# Altium footprint library LCM.PcbLib: 29 footprints (part 1 of 2)
Each footprint in its own frame and in the unit in brackets; x right, y up, seen from the top. Pads: shape width x height; smd on the part's side, far side on the other; paste and mask are expansions set on the pad; w line width, h text height; cw(c..) or ccw(c..) is an arc to the next point about the centre after c.
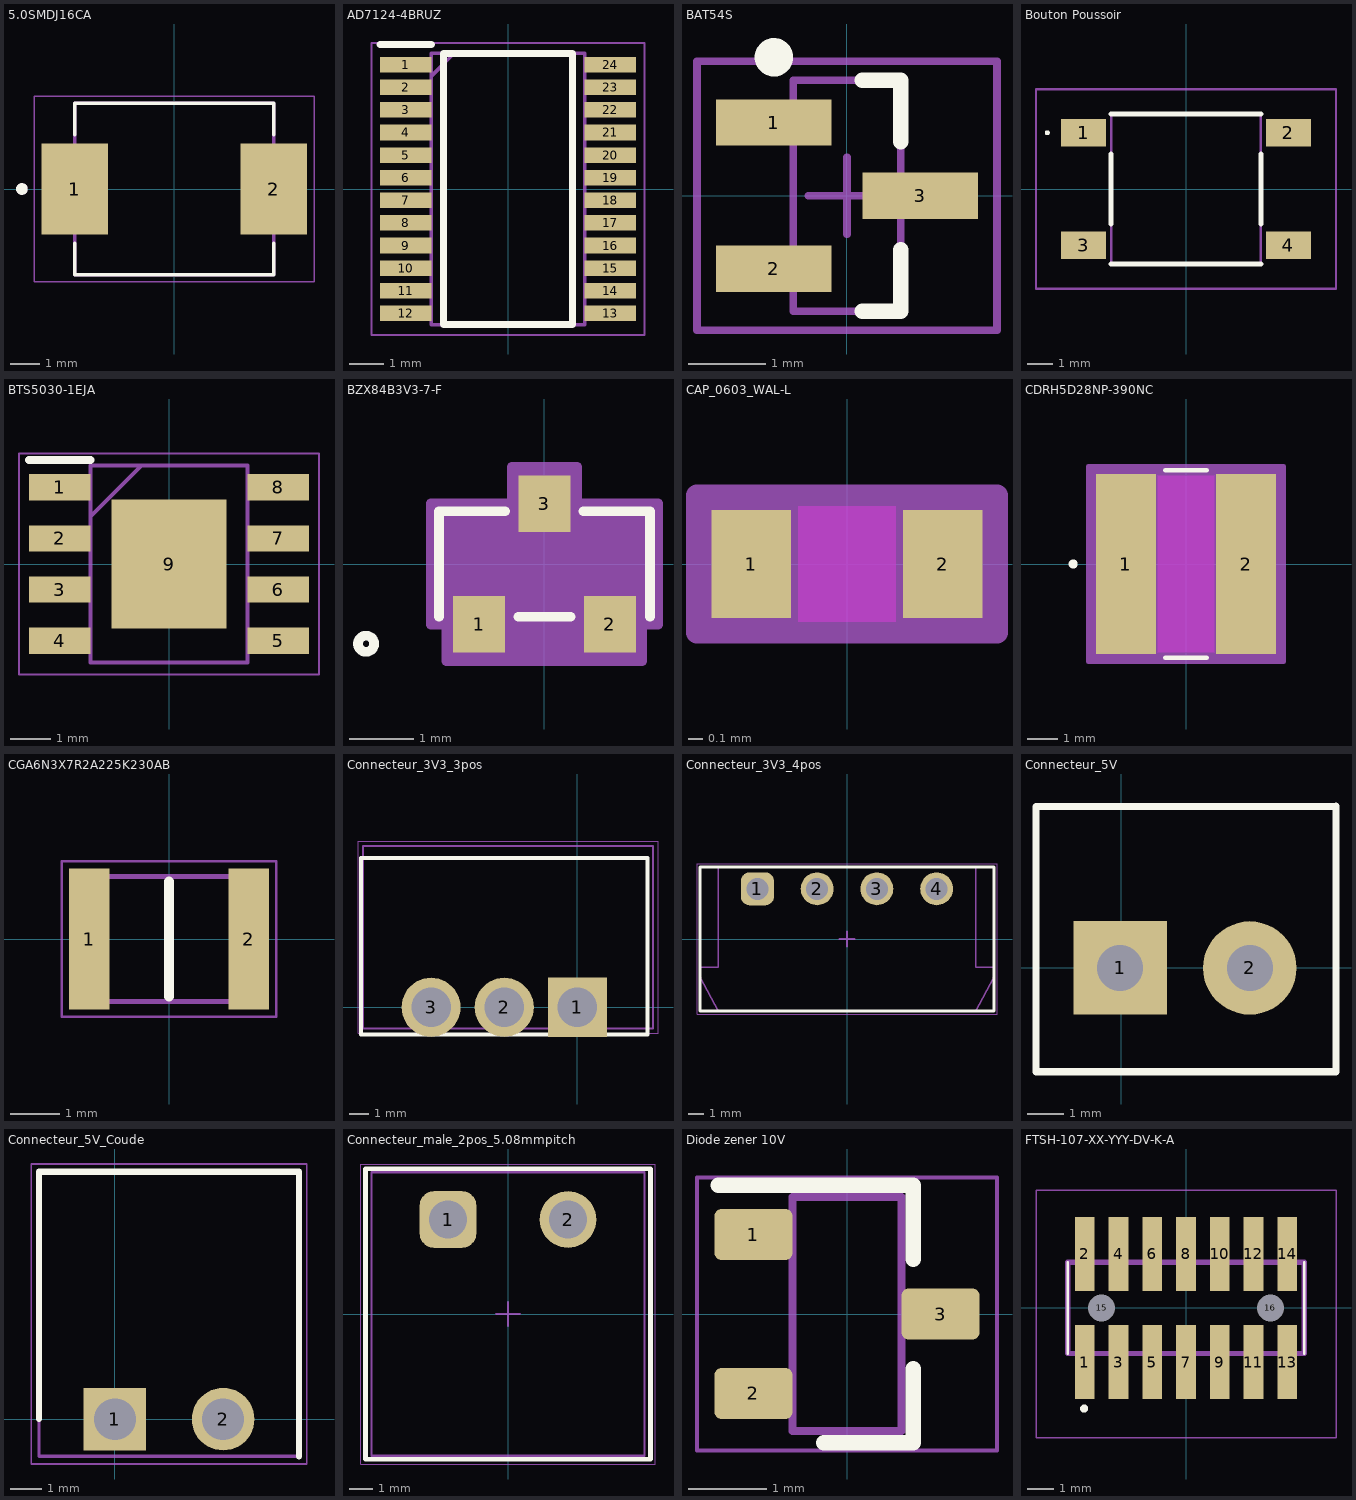
[diagram p0: the footprints below, top view; thin cyan lines are the x and y axes]

## 5.0SMDJ16CA [mm]
pads (2):
  rect 2.29x3.12 smd paste+0 mask+0.102: 1(-3.43,0) 2(3.43,0)
Top Overlay:
  circle w0.2: c-5.25,0 r0.1
  lines w0.127: -3.427,-1.88 -3.427,-2.953 3.427,-2.953 3.427,-1.88 ; -3.427,1.88 -3.427,2.953 3.427,2.953 3.427,1.88
Top 3D Body:
  circle w0.2: c-5.25,0 r0.1
  lines w0.05: -4.825,-3.203 -4.825,3.203 4.825,3.203 4.825,-3.203 -4.825,-3.203
  lines w0.127: -3.427,-2.953 -3.427,2.953 3.427,2.953 3.427,-2.953 -3.427,-2.953
3D body "step_temp.STEP": height 2.62, standoff 0, extent -3.97,-2.953 3.97,2.953

## AD7124-4BRUZ [mm]
pads (24):
  rect 1.475x0.45 smd: 1(-2.938,3.575) 2(-2.938,2.925) 3(-2.938,2.275) 4(-2.938,1.625) 5(-2.938,0.975) 6(-2.938,0.325) 7(-2.938,-0.325) 8(-2.938,-0.975) 9(-2.938,-1.625) 10(-2.938,-2.275) 11(-2.938,-2.925) 12(-2.938,-3.575) 13(2.938,-3.575) 14(2.938,-2.925) 15(2.938,-2.275) 16(2.938,-1.625) 17(2.938,-0.975) 18(2.938,-0.325) 19(2.938,0.325) 20(2.938,0.975) 21(2.938,1.625) 22(2.938,2.275) 23(2.938,2.925) 24(2.938,3.575)
Top Overlay:
  lines w0.2: -3.675,4.15 -2.2,4.15 ; -1.85,-3.9 -1.85,3.9 1.85,3.9 1.85,-3.9 -1.85,-3.9
Mechanical 15:
  lines w0.1: -2.2,3.25 -1.55,3.9 ; -2.2,-3.9 -2.2,3.9 2.2,3.9 2.2,-3.9 -2.2,-3.9
Mechanical 20:
  lines w0.05: -3.925,-4.2 -3.925,4.2 3.925,4.2 3.925,-4.2 -3.925,-4.2
3D body "AD7124-4BRUZ.stp": height 1.2, standoff 0, extent -3.2,-3.9 3.2,3.9

## BAT54S [mm] "SOT23, 3-Leads, Body 2.9x1.3mm, Pitch 0.95mm, Lead Span 2.5mm, IPC Medium Density"
height 1.1
pads (3):
  rect 1.5x0.6 smd: 1(-0.95,0.95) 2(-0.95,-0.95) 3(0.95,0)
Top Overlay:
  circle w0.25: c-0.95,1.8 r0.125
  lines w0.2: 0.2,-1.5 0.7,-1.5 0.7,-0.7 ; 0.2,1.5 0.7,1.5 0.7,0.7
Top 3D Body:
  lines w0.1: -0.7,-1.5 0.7,-1.5 0.7,1.5 -0.7,1.5 -0.7,-1.5
Mechanical 15:
  lines w0.1: -0.5,0 0.5,0 ; 0,-0.5 0,0.5 ; -1.95,-1.75 1.95,-1.75 1.95,1.75 -1.95,1.75 -1.95,-1.75
3D body: height 1.1, standoff 0, extent -0.7,-1.5 0.7,1.5
3D body "SW3dPS-3-lead sot23-3.STEP": height 1.01, standoff -0.01, extent -1.245,-1.435 1.231,1.485

## Bouton Poussoir [mm] "TS406633BK260SMTTR"
pads (4):
  rect 1.8x1.1 smd: 1(-4.1,2.25) 2(4.1,2.25) 3(-4.1,-2.25) 4(4.1,-2.25)
Top Overlay:
  lines w0.1: -5.6,2.25 ccw(c-5.55,2.25) -5.5,2.25 ccw(c-5.55,2.25) -5.6,2.25
  lines w0.2: -3,-3 3,-3 ; -3,-1.4 -3,1.4 ; -3,3 3,3 ; 3,-1.4 3,1.4
Top 3D Body:
  lines w0.1: -3,-3 3,-3 3,3 -3,3 -3,-3
Mechanical 15:
  lines w0.1: -6,-4 6,-4 6,4 -6,4 -6,-4
3D body "TS40-66-33-BK-260-SMT-TR.stp": height 3.3, standoff 0, extent -4.5,-3 4.5,3

## BTS5030-1EJA [mm]
pads (9):
  rect 1.525x0.65 smd: 1(-2.712,1.905) 2(-2.712,0.635) 3(-2.712,-0.635) 4(-2.712,-1.905) 5(2.712,-1.905) 6(2.712,-0.635) 7(2.712,0.635) 8(2.712,1.905)
  rect 2.85x3.2 smd: 9(0,0)
Top Overlay:
  lines w0.2: -3.475,2.58 -1.95,2.58
Mechanical 15:
  lines w0.1: -1.95,1.18 -0.68,2.45 ; -1.95,-2.45 1.95,-2.45 1.95,2.45 -1.95,2.45 -1.95,-2.45
Mechanical 20:
  lines w0.05: -3.725,-2.75 3.725,-2.75 3.725,2.75 -3.725,2.75 -3.725,-2.75
3D body "BTS5030-1EJA.stp": height 1.7, standoff 0, extent -3,-2.45 3,2.45

## BZX84B3V3-7-F [mil]
pads (3):
  rect 32x35 smd paste+0 mask+0: 1(-40.35,-37.2) 2(40.35,-37.2) 3(0,37.2)
Top Overlay:
  circle w6: c-110.04,-49.21 r5
  lines w6: -65.04,-32.56 -65.04,32.56 -24.14,32.56 ; -16.21,-32.56 16.21,-32.56 ; 24.14,32.56 65.04,32.56 65.04,-32.56
Top 3D Body:
  circle w0: c-50.04,-17.56 r5
  lines w1: -60.04,-27.56 60.04,-27.56 60.04,27.56 -60.04,27.56 -60.04,-27.56 ; -50.39,-49.21 -50.39,-27.56 -30.32,-27.56 -30.32,-49.21 -50.39,-49.21 ; -10.04,27.56 10.04,27.56 10.04,49.21 -10.04,49.21 -10.04,27.56 ; 30.32,-49.21 30.32,-27.56 50.39,-27.56 50.39,-49.21 30.32,-49.21
Mechanical 15:
  region: -70.04,-37.56 -70.04,37.56 -20.04,37.56 -20.04,60 20,60 20.04,37.56 70.04,37.56 70.04,-37.56 60.39,-37.56 60.39,-60 -60.39,-60 -60.39,-37.56
  region: 60.04,-27.56 -60.04,-27.56 -60.04,27.56 60.04,27.56
  lines w6: -60.39,-60 -60.39,-37.56 -70.04,-37.56 -70.04,37.56 -20.04,37.56 -20,60 ; -60,-60 60,-60 ; -20.04,60 20.04,60 20.04,37.56 70.04,37.56 70.04,-37.56 60.39,-37.56 60.39,-60
3D body "BZX84B3V3-7-F.stp": height 39.37, standoff -3.94, extent -59.06,-49.63 59.06,54.75

## CAP_0603_WAL-L [mil]
pads (2):
  rect 22x30 smd paste+0 mask+0: 1(-26.5,0) 2(26.5,0)
Top Layer keep-out:
  region: -13.5,-14 -13.5,14 13.5,14 13.5,-14
Keep-Out Layer:
  region: -13.5,-16 -13.5,16 13.5,16 13.5,-16
Top 3D Body:
  circle w1: c-21.5,0 r3
  lines w1: -31.5,-16 -31.5,16 ; -31.5,-16 31.5,-16 ; -31.5,-16 -15.5,-16 -15.5,16 -31.5,16 ; -31.5,-16 -31.5,16 ; -31.5,16 31.5,16 ; 31.5,-16 31.5,16 ; 31.5,-16 31.5,16 ; 31.5,-16 15.5,-16 15.5,16 31.5,16
Mechanical 15:
  region: 41.5,-19 -41.5,-19 -41.5,19 41.5,19
  lines w6: -41.5,-19 41.5,-19 41.5,19 -41.5,19 -41.5,-19
3D body "CAP_0603_WAL.step": height 32.01, standoff 0, extent -31.5,-15.98 31.5,15.98

## CDRH5D28NP-390NC [mil] "Inductance, 39µH, 700mA"
pads (2):
  rect 78.63x236 smd paste+0 mask+0: 1(-78.69,0) 2(78.69,0)
Top Layer keep-out:
  region: -37.37,-116 -37.37,116 37.37,116 37.37,-116
Top Overlay:
  circle w6: c-148,0 r3
  lines w6: -27.26,-123 27.26,-123 ; -27.26,123 27.26,123
Top 3D Body:
  circle w1: c-115,0 r3
  lines w1: -118,-118 118,-118 118,118 -118,118 -118,-118
Mechanical 15:
  region: -128,-128 -128,128 128,128 128,-128
  lines w6: -128,-128 -128,128 128,128 128,-128 -128,-128
3D body "IND_NP-100NC_SUM.step": height 118.11, standoff -0.12, extent -117.99,-118.11 117.99,118.11

## CGA6N3X7R2A225K230AB [mm] "Condensateurs céramique multicouches MLCC - CMS CGA 1210 100V 2.2uF X7R 10% AEC-Q200"
pads (2):
  rect 0.81x2.82 smd: 1(-1.6,0) 2(1.6,0)
Top Overlay:
  lines w0.2: 0,-1.15 0,1.15
Mechanical 15:
  lines w0.1: -1.6,-1.25 -1.6,1.25 1.6,1.25 1.6,-1.25 -1.6,-1.25
Mechanical 20:
  lines w0.05: -2.155,-1.56 -2.155,1.56 2.155,1.56 2.155,-1.56 -2.155,-1.56
3D body "CGA6N3X7R2A225K230AB.stp": height 2.28, standoff 0.02, extent -1.4,-1.225 1.4,1.225

## Connecteur_3V3_3pos [mm]
pads (3):
  rect 3.075x3.075 / inner round 3.075 / far side rect 3.075x3.075 hole 2.05: 1(0,0)
  round 3.075 hole 2.05: 2(-3.81,0) 3(-7.62,0)
Top Overlay:
  lines w0.2: -11.27,-1.425 3.65,-1.425 3.65,7.775 -11.27,7.775 -11.27,-1.425
Top Assembly:
  lines w0.1: -11.27,-1.425 3.65,-1.425 3.65,7.775 -9.144,7.775 -11.27,7.775 -11.27,-1.425
Mechanical 15:
  lines w0.1: -11.18,-1.1 -11.18,8.4 3.95,8.4 3.95,-1.1 -11.18,-1.1
Mechanical 20:
  lines w0.05: -11.43,-1.35 -11.43,8.65 4.2,8.65 4.2,-1.35 -11.43,-1.35
3D body "691305340003.stp": height 7.28, standoff -3.42, extent -11.27,-1.425 3.65,7.775

## Connecteur_3V3_4pos [mm] "Horizontal PCB Header with Plastic Latch, pitch 3.81mm, 04p"
height 7
pads (4):
  rrect50% 2.1x2.1 hole 1.4: 1(-5.715,3.2)
  round 2.1 hole 1.4: 2(-1.905,3.2) 3(1.905,3.2) 4(5.715,3.2)
Top Overlay:
  lines w0.2: -9.37,-4.6 -3.621,-4.6 4.971,-4.6 9.37,-4.6 9.37,-1.958 9.37,4.6 -9.37,4.6 -9.37,-1.952 -9.37,-4.6
Top Courtyard:
  lines w0.05: -9.57,-4.8 -9.57,4.8 9.57,4.8 9.57,-4.8 -9.57,-4.8
Top Assembly:
  lines w0.1: -9.372,-2.451 -8.22,-4.6 8.22,-4.6 9.372,-2.451 ; -9.37,-2.45 -9.37,-1.8 -8.22,-1.8 -8.22,4.6 8.22,4.6 8.22,-1.8 9.37,-1.8 9.37,-2.45
Top 3D Body:
  lines w0.1: -9.37,-2.45 -9.37,-1.8 -8.22,-1.8 -8.22,4.6 8.22,4.6 8.22,-1.8 9.37,-1.8 9.37,-2.45 ; -8.22,-4.6 8.22,-4.6 9.372,-2.451
Top Component Center:
  lines w0.1: -0.5,0 0.5,0 ; 0,-0.5 0,0.5
3D body "691305340004.stp": height 7.25, standoff -3.45, extent -9.365,-4.6 9.365,4.6

## Connecteur_5V [mm]
pads (2):
  rect 2.54x2.54 hole 1.25: 1(-0.025,0)
  round 2.54 hole 1.25: 2(3.5,0)
Top Overlay:
  lines w0.2: -2.311,-2.819 -2.311,4.389 5.842,4.394 5.842,-2.819 -2.311,-2.819
3D body "WURTH_2V_3.5mm_691363110002.stp": height 21.81, standoff 2.51, extent -1.544,-5.08 5.456,5.32
3D body "WURTH_2V_male_3.5mm_691321100002.stp": height 9.2, standoff -3.5, extent -2.272,-2.787 5.828,4.413

## Connecteur_5V_Coude [mm]
pads (2):
  rect 2.025x2.025 hole 1.35: 1(0,0)
  round 2.025 hole 1.35: 2(3.5,0)
Top Overlay:
  lines w0.2: -2.45,0 -2.45,8 5.95,8 5.95,-1.2
Mechanical 15:
  lines w0.1: -2.45,-1.2 -2.45,8 5.95,8 5.95,-1.2 -2.45,-1.2
Mechanical 20:
  lines w0.05: -2.7,-1.45 6.2,-1.45 6.2,8.25 -2.7,8.25 -2.7,-1.45
3D body "1844210.stp": height 7.25, standoff -3.4, extent -2.45,-1.2 5.95,8

## Connecteur_male_2pos_5.08mmpitch [mm] "5,08mm - PCB Headers - Horizontal - Closed ends - 02p"
height 7.8
pads (2):
  rrect50% 2.4x2.4 hole 1.6: 1(-2.54,4)
  round 2.4 hole 1.6: 2(2.54,4)
Top Overlay:
  lines w0.2: -6.03,-6.15 -6.03,6.15 6.03,6.15 6.03,-6.15 -6.03,-6.15
Top Courtyard:
  lines w0.05: -6.23,-6.35 6.23,-6.35 6.23,6.35 -6.23,6.35 -6.23,-6.35
Top Assembly:
  lines w0.1: -6.03,-6.15 -6.03,6.15 6.03,6.15 6.03,-6.15 -6.03,-6.15
Top 3D Body:
  lines w0.1: -5.78,-6 5.78,-6 5.78,6 -5.78,6 -5.78,-6
Top Component Center:
  lines w0.1: -0.5,0 0.5,0 ; 0,-0.5 0,0.5
3D body "691313510002.stp": height 8.7, standoff -3.8, extent -5.78,-6 5.78,6

## Diode zener 10V [mm] "SOT23, 3-Leads, IPC Medium Density, TO-236"
height 1.1
pads (3):
  rrect25% 1x0.65 smd: 1(-1.2,1.02) 2(-1.2,-1.02) 3(1.2,0)
Top Overlay:
  lines w0.2: -1.65,1.65 0.85,1.65 0.85,0.7 ; -0.3,-1.65 0.85,-1.65 0.85,-0.7
Top 3D Body:
  lines w0.1: -0.7,-1.5 -0.7,1.5 0.7,1.5 0.7,-1.5 -0.7,-1.5
Mechanical 15:
  lines w0.05: -1.925,-1.75 -1.925,1.75 1.925,1.75 1.925,-1.75 -1.925,-1.75
3D body "p200_SOT-23.stp": height 1.3, standoff 0, extent -1.3,-1.52 1.3,1.52

## FTSH-107-XX-YYY-DV-K-A [mm]
pads (16):
  rect 0.74x2.79 smd: 1(-3.81,-2.035) 2(-3.81,2.035) 3(-2.54,-2.035) 4(-2.54,2.035) 5(-1.27,-2.035) 6(-1.27,2.035) 7(0,-2.035) 8(0,2.035) 9(1.27,-2.035) 10(1.27,2.035) 11(2.54,-2.035) 12(2.54,2.035) 13(3.81,-2.035) 14(3.81,2.035)
  round 0.51 hole 1.02 unplated: 15(-3.175,0) 16(3.175,0)
Top Overlay:
  circle w0.2: c-3.835,-3.785 r0.05
  lines w0.1: -4.445,-1.715 -4.445,1.715 ; 4.445,-1.715 4.445,1.715
Top 3D Body:
  lines w0.2: -4.445,-1.715 4.445,-1.715 4.445,1.715 -4.445,1.715 -4.445,-1.715
Mechanical 15:
  lines w0.05: -5.645,-4.885 5.645,-4.885 5.645,4.43 -5.645,4.43 -5.645,-4.885
3D body "FTSH-107-01-L-DV-K-A.stp": height 5.97, standoff 0, extent -4.44,-3.15 4.45,2.69